# Altium footprint library Magnetic.PcbLib: 1 footprints
Each footprint in its own frame and in the unit in brackets; x right, y up, seen from the top. Pads: shape width x height; smd on the part's side, far side on the other; paste and mask are expansions set on the pad; w line width, h text height; cw(c..) or ccw(c..) is an arc to the next point about the centre after c.
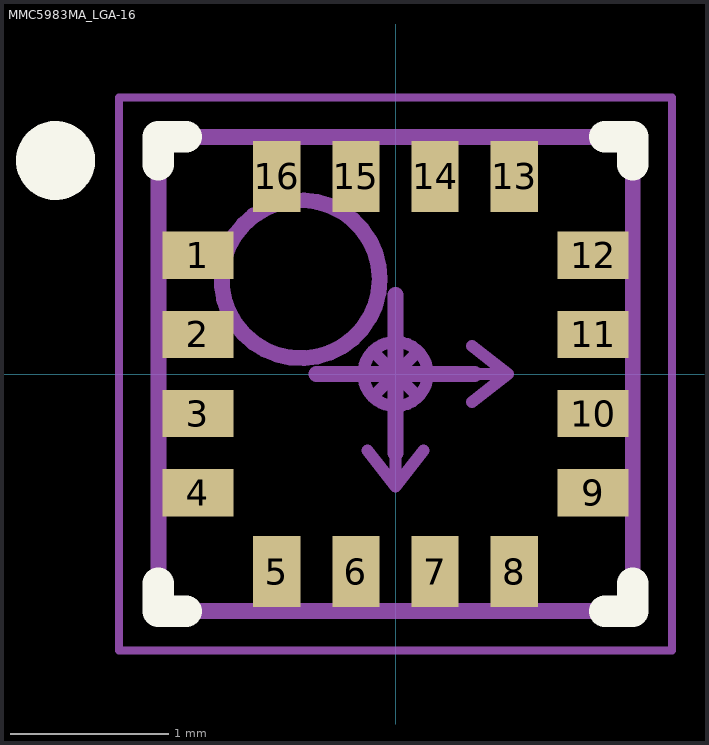
[diagram p0: the footprint, top view; thin cyan lines are the x and y axes]

## MMC5983MA_LGA-16 [mm] "PQFN, 16-Leads, Body 3.00x3.00mm, Pitch 0.50mm, IPC Medium Density"
height 1
pads (16):
  rect 0.45x0.3 smd: 1(-1.25,0.75) 2(-1.25,0.25) 3(-1.25,-0.25) 4(-1.25,-0.75) 9(1.25,-0.75) 10(1.25,-0.25) 11(1.25,0.25) 12(1.25,0.75)
  rect 0.3x0.45 smd: 5(-0.75,-1.25) 6(-0.25,-1.25) 7(0.25,-1.25) 8(0.75,-1.25) 13(0.75,1.25) 14(0.25,1.25) 15(-0.25,1.25) 16(-0.75,1.25)
Top Overlay:
  circle w0.25: c-2.15,1.35 r0.125
  lines w0.2: -1.5,-1.325 -1.5,-1.5 -1.325,-1.5 ; -1.5,1.325 -1.5,1.5 -1.325,1.5 ; 1.325,-1.5 1.5,-1.5 1.5,-1.325 ; 1.325,1.5 1.5,1.5 1.5,1.325
Mechanical 1:
  circle w0.076: c0,0 r0.203
  lines w0.076: -0.178,-0.483 0,-0.711 ; -0.141,-0.141 0.141,0.141 ; -0.141,0.141 0.141,-0.141 ; 0,-0.203 0,-0.711 ; 0.178,-0.483 0,-0.711 ; 0.203,0 0.711,0 ; 0.483,-0.178 0.711,0 ; 0.483,0.178 0.711,0
  text "Z" at -0.322,0.559 h0.25
  text "Y" at 0.55,0.305 h0.25
  text "X" at -0.322,-0.483 h0.25
Top Designator:
  text ".Designator" at -5.998,-0.4 h1.2
Mechanical 13:
  circle w0.1: c-0.6,0.6 r0.5
  lines w0.1: -1.5,-1.5 1.5,-1.5 1.5,1.5 -1.5,1.5 -1.5,-1.5
Mechanical 15:
  lines w0.05: -1.75,-1.75 1.75,-1.75 1.75,1.75 -1.75,1.75 -1.75,-1.75
  lines w0.1: -0.5,0 0.5,0 ; 0,-0.5 0,0.5
3D body "PQFN50P300X300X100-16N.step": height 1, standoff 0, extent -1.5,-1.5 1.5,1.5